# Altium integrated library button.IntLib: 1 symbol
Pins are listed as number, name and electrical type; pins without a type are passive.

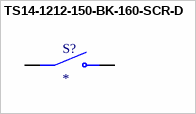
[diagram p0: symbol TS14-1212-150-BK-160-SCR-D]

## TS14-1212-150-BK-160-SCR-D
designator S?
12 x 12 mm, 15 mm Actuator Height, 160 gf, Short Crimped, Black, Through Hole, SPST, Tactile Switch; MF: Same Sky; MP: TS14-1212-150-BK-160-SCR-D; SnapEDA_Link: https://www.snapeda.com/parts/TS14-1212-150-BK-160-SCR-D/Same+Sky/view-part/?ref=snap; Package: None; Value: *; Check_prices: https://www.snapeda.com/parts/TS14-1212-150-BK-160-SCR-D/Same+Sky/view-part/?ref=eda
footprint SW_TS14-1212-150-BK-160-SCR-D
pins: 1 NO, 2 NO, 3 COM, 4 COM